# Altium integrated library 06035C104MAZ2A.IntLib: 1 symbol
Pins are listed as number, name and electrical type; pins without a type are passive.

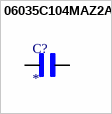
[diagram p0: symbol 06035C104MAZ2A]

## 06035C104MAZ2A
designator C?
Cap Ceramic 0.1uF 50V X7R 20% Pad SMD 0603 FlexiTerm 125C T/R; MF: AVX; MP: 06035C104MAZ2A; SnapEDA_Link: https://www.snapeda.com/parts/06035C104MAZ2A/AVX/view-part/?ref=snap; Package: 1608 AVX; Value: *; Check_prices: https://www.snapeda.com/parts/06035C104MAZ2A/AVX/view-part/?ref=eda
footprint CAPC1608X90N
pins: 1, 2